# Altium schematic symbol library LD3985M33R.SchLib: 1 symbol
Pins are listed as number, name and electrical type; pins without a type are passive.

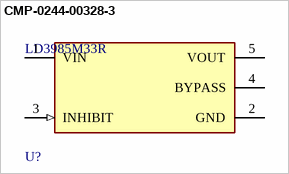
[diagram p0: symbol CMP-0244-00328-3]

## CMP-0244-00328-3
designator U?, comment LD3985M33R
NexarPartId: 526998; Min Output Voltage: 3.3V; Min Input Voltage: 2.5V; Max Junction Temperature (Tj): 125°C; Min Current Limit: 300mA; Input Bias Current: 85µA; Max Supply Voltage: 6V; Quiescent Current: 150µA; Max Output Current: 150mA; Number of Channels: 1; Output Type: Fixed; Output Voltage Accuracy: 2%; Polarity: Positive; Dropout Voltage: 60mV; Width: 1.75mm; Height: 1.3mm; Lifecycle Status: Production; Case/Package: SOT-23; RoHS: Compliant; Output Current: 150mA; Radiation Hardening: No; Number of Regulators: 1; Max Operating Temperature: 125°C; Output Voltage: 3.3V; Min Supply Voltage: 2.5V; Min Operating Temperature: -40°C; Accuracy: 2%; Number of Outputs: 1; Number of Pins: 5; Packaging: Cut Tape (CT); Lead Free: Lead Free; Schedule B: 8542390000, 8542390000|8542390000, 8542390000|8542390000|8542390000, 8542390000|8542390000|8542390000|8542390000; Mount: Surface Mount; Max Input Voltage: 6V; Length: 3mm
footprint FP-SOT23-5L-7049676-IPC_C
footprint FP-SOT23-5L-7049676-IPC_A
footprint FP-SOT23-5L-7049676-IPC_B
footprint FP-SOT23-5L-7049676-MFG
pins: 1 VIN (power), 2 GND (power), 3 INHIBIT (in), 4 BYPASS, 5 VOUT